# Altium schematic symbol library SY8286A.SchLib: 1 symbol
Pins are listed as number, name and electrical type; pins without a type are passive.

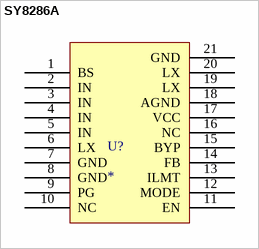
[diagram p0: symbol SY8286A]

## SY8286A
designator U?
High-efficiency synchronous DC-DC step-down converter with integrated MOSFETs.
footprint QFN45P300X300X90-21N (QFN, 20-Leads, Body 3.00x3.00mm, Pitch 0.45mm, Thermal Pad 1.00x1.00mm, IPC Medium Density)
pins: 1 BS, 2 IN, 3 IN, 4 IN, 5 IN, 6 LX, 7 GND, 8 GND, 9 PG, 10 NC, 11 EN, 12 MODE, 13 ILMT, 14 FB, 15 BYP, 16 NC, 17 VCC, 18 AGND, 19 LX, 20 LX, 21 GND